# Altium footprint library DAPLink.PcbLib: 21 footprints (part 2 of 2)
Each footprint in its own frame and in the unit in brackets; x right, y up, seen from the top. Pads: shape width x height; smd on the part's side, far side on the other; paste and mask are expansions set on the pad; w line width, h text height; cw(c..) or ccw(c..) is an arc to the next point about the centre after c.
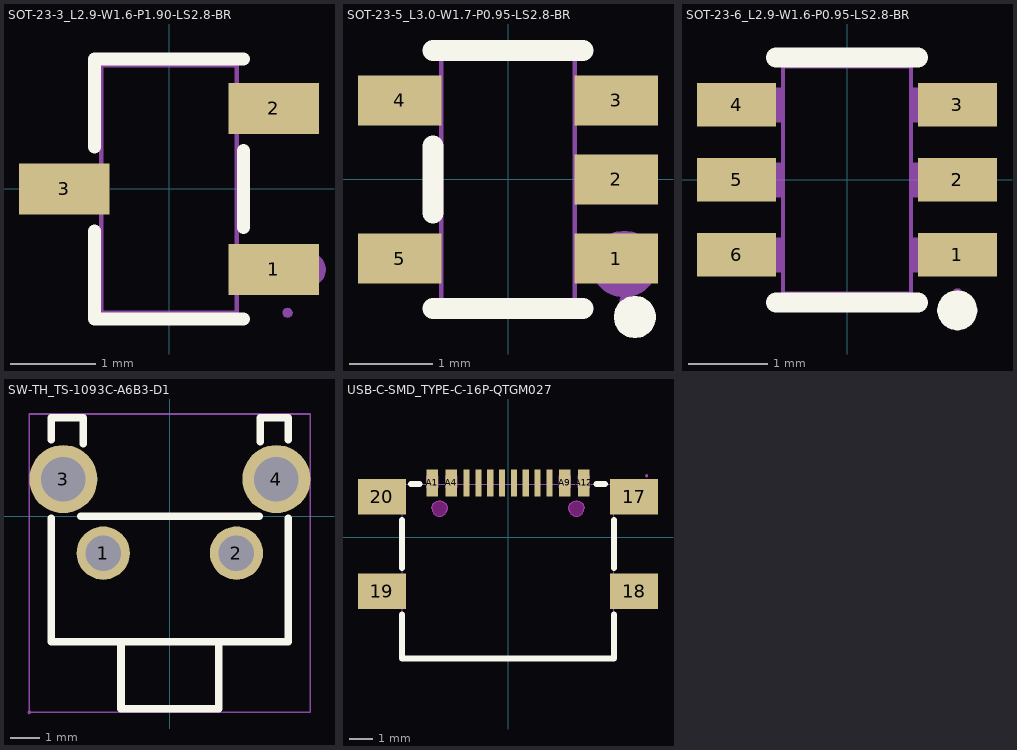
[diagram p1: the footprints below, top view; thin cyan lines are the x and y axes]

## SOT-23-3_L2.9-W1.6-P1.90-LS2.8-BR [mil]
pads (3):
  rect 42.1x23.6 smd paste+0 mask+2: 1(48.6,-37.4) 2(48.6,37.4) 3(-48.6,0)
Top Overlay:
  lines w6: -34.5,-19.5 -34.5,-60.5 34.5,-60.5 ; -34.5,19.4 -34.5,60.4 34.5,60.4 ; 34.5,-18 34.5,17.9
Mechanical 6:
  lines w7.9: 61.1,-37.4 61.5,-35.7 62.5,-34.4 64.1,-33.6 65.9,-33.6 67.5,-34.4 68.6,-35.7 68.9,-37.4 68.6,-39.2 67.5,-40.5 65.9,-41.3 64.1,-41.3 62.5,-40.5 61.5,-39.2 61.1,-37.4
Mechanical 7:
  lines w2: -31.5,-57.5 31.5,-57.5 31.5,57.4 -31.5,57.4 -31.5,-57.5
Mechanical 8:
  region: 57.5,-57.5 57.1,-58.8 56.1,-59.7 54.8,-59.9 53.6,-59.3 52.8,-58.2 52.8,-56.9 53.6,-55.7 54.8,-55.2 56.1,-55.4 57.1,-56.3
Mechanical 9:
  region: -37.4,-7.9 -37.4,7.8 -55.1,7.8 -55.1,-7.9
  region: 37.4,29.5 37.4,45.2 55.1,45.2 55.1,29.5
  region: 37.4,-45.3 37.4,-29.6 55.1,-29.6 55.1,-45.3
Mechanical 10:
  region: -37.8,-7.9 -37.8,7.8 -31.1,7.8 -31.1,-7.9
  region: 31.1,29.5 31.1,45.2 37.8,45.2 37.8,29.5
  region: 31.1,-45.3 31.1,-29.6 37.8,-29.6 37.8,-45.3

## SOT-23-5_L3.0-W1.7-P0.95-LS2.8-BR [mil]
pads (5):
  rect 39.4x23.6 smd paste+0 mask+2: 1(51.2,-37.4) 2(51.2,0) 3(51.2,37.4) 4(-51.2,37.4) 5(-51.2,-37.4)
Top Overlay:
  lines w10: -35.4,-61 35.4,-61 ; -35.4,-15.8 -35.4,15.7 ; -35.4,61 35.4,61 ; 55,-65 55.4,-63.1 56.4,-61.5 58.1,-60.4 60,-60 61.9,-60.4 63.5,-61.5 64.6,-63.1 65,-65 64.6,-66.9 63.5,-68.6 61.9,-69.7 60,-70 58.1,-69.7 56.4,-68.6 55.4,-66.9 55,-65
Mechanical 6:
  lines w15.7: 47.1,-40 47.5,-37.6 48.6,-35.4 50.3,-33.6 52.5,-32.5 55,-32.1 57.4,-32.5 59.6,-33.6 61.4,-35.4 62.5,-37.6 62.9,-40 62.5,-42.5 61.4,-44.7 59.6,-46.4 57.4,-47.5 55,-47.9 52.5,-47.5 50.3,-46.4 48.6,-44.7 47.5,-42.5 47.1,-40
Mechanical 7:
  lines w2: -31.5,-57.1 -31.5,57.1 31.5,57.1 31.5,-57.1 -31.5,-57.1
Mechanical 8:
  region: 57.5,-57.1 57.1,-58.4 56.1,-59.3 54.7,-59.5 53.5,-58.9 52.8,-57.8 52.8,-56.5 53.5,-55.3 54.7,-54.8 56.1,-54.9 57.1,-55.8
Mechanical 9:
  region: -55.1,-45.3 -55.1,-29.5 -37.4,-29.5 -37.4,-45.3
  region: -55.1,29.5 -55.1,45.3 -37.4,45.3 -37.4,29.5
  region: 37.4,29.5 37.4,45.3 55.1,45.3 55.1,29.5
  region: 37.4,-7.9 37.4,7.9 55.1,7.9 55.1,-7.9
  region: 37.4,-45.3 37.4,-29.5 55.1,-29.5 55.1,-45.3
Mechanical 10:
  region: -37.8,-45.3 -37.8,-29.5 -31.1,-29.5 -31.1,-45.3
  region: -37.8,29.5 -37.8,45.3 -31.1,45.3 -31.1,29.5
  region: 31.1,29.5 31.1,45.3 37.8,45.3 37.8,29.5
  region: 31.1,-7.9 31.1,7.9 37.8,7.9 37.8,-7.9
  region: 31.1,-45.3 31.1,-29.5 37.8,-29.5 37.8,-45.3

## SOT-23-6_L2.9-W1.6-P0.95-LS2.8-BR [mil]
pads (6):
  rect 39.4x21.7 smd paste+0 mask+2: 1(55.1,-37.4) 2(55.1,0) 3(55.1,37.4) 4(-55.1,37.4) 5(-55.1,0) 6(-55.1,-37.4)
Top Overlay:
  lines w10: -35.4,-61 35.4,-61 ; -35.4,61 35.4,61 ; 50,-65 50.4,-63 51.5,-61.4 53.1,-60.3 55,-60 57,-60.3 58.6,-61.4 59.7,-63 60,-65 59.7,-66.9 58.6,-68.5 57,-69.6 55,-70 53.1,-69.6 51.5,-68.5 50.4,-66.9 50,-65
Mechanical 6:
  lines w7.9: 51.2,-37.4 51.6,-35.7 52.7,-34.3 54.3,-33.6 56,-33.6 57.6,-34.3 58.7,-35.7 59,-37.4 58.7,-39 57.6,-40.4 56,-41.2 54.3,-41.2 52.7,-40.4 51.6,-39 51.2,-37.4
Mechanical 7:
  lines w2: -31.9,-56.5 31.9,-56.5 31.9,56.5 -31.9,56.5 -31.9,-56.5
Mechanical 8:
  region: 57.5,-56.5 57.2,-57.8 56.1,-58.6 54.8,-58.8 53.6,-58.3 52.8,-57.1 52.8,-55.8 53.6,-54.6 54.8,-54.1 56.1,-54.3 57.2,-55.2
Mechanical 9:
  region: 36.4,-45.9 36.4,-28.9 55.1,-28.9 55.1,-45.9
  region: 36.4,-8.5 36.4,8.5 55.1,8.5 55.1,-8.5
  region: 36.4,28.9 36.4,45.9 55.1,45.9 55.1,28.9
  region: -36.4,28.9 -36.4,45.9 -55.1,45.9 -55.1,28.9
  region: -36.4,-8.5 -36.4,8.5 -55.1,8.5 -55.1,-8.5
  region: -36.4,-45.9 -36.4,-28.9 -55.1,-28.9 -55.1,-45.9
Mechanical 10:
  region: 36.8,45.9 36.8,28.9 31.1,28.9 31.1,45.9
  region: 36.8,8.5 36.8,-8.5 31.1,-8.5 31.1,8.5
  region: 36.8,-28.9 36.8,-45.9 31.1,-45.9 31.1,-28.9
  region: -36.8,-45.9 -36.8,-28.9 -31.1,-28.9 -31.1,-45.9
  region: -36.8,-8.5 -36.8,8.5 -31.1,8.5 -31.1,-8.5
  region: -36.8,28.9 -36.8,45.9 -31.1,45.9 -31.1,28.9

## SW-TH_TS-1093C-A6B3-D1 [mil]
pads (4):
  round 70.9 hole 47.2 paste-99999 mask+2: 1(-88.6,-49.2) 2(88.6,-49.2)
  round 90.6 hole 59.1 paste-99999 mask+2: 3(-141.7,49.2) 4(141.7,49.2)
Top Overlay:
  lines w10: -157.5,-2.8 -157.5,-167.3 157.5,-167.3 157.5,-2.8 ; -157.5,101.3 -157.5,130.8 -115,130.8 -115,96.5 ; -118.7,0 118.7,0 ; -65,-167.3 -65,-255.9 65,-255.9 65,-167.3 ; 120,99 120,130.8 157.5,130.8 157.5,101.3
Mechanical 7:
  lines w2: -187,-260.9 -187,135.8 187,135.8 187,-260.9 -187,-260.9
Mechanical 8:
  region: -184.6,-260.9 -185,-262.2 -186,-263.1 -187.4,-263.2 -188.6,-262.7 -189.3,-261.5 -189.3,-260.2 -188.6,-259.1 -187.4,-258.5 -186,-258.7 -185,-259.6
Mechanical 9:
  region: 167.3,49.2 166.9,44.8 165.7,40.5 163.8,36.4 161.3,32.8 158.1,29.6 154.5,27.1 150.4,25.2 146.1,24 141.7,23.6 137.2,24 132.9,25.2 128.9,27.1 125.2,29.6 122,32.8 119.5,36.4 117.6,40.5 116.4,44.8 116.1,49.2 116.4,53.7 117.6,58 119.5,62 122,65.7 125.2,68.8 128.9,71.4 132.9,73.3 137.2,74.4 141.7,74.8 146.1,74.4 150.4,73.3 154.5,71.4 158.1,68.8 161.3,65.7 163.8,62 165.7,58 166.9,53.7
  region: -116.1,49.2 -116.5,44.8 -117.7,40.5 -119.6,36.4 -122.1,32.8 -125.3,29.6 -128.9,27.1 -133,25.2 -137.3,24 -141.7,23.6 -146.2,24 -150.5,25.2 -154.5,27.1 -158.2,29.6 -161.4,32.8 -163.9,36.4 -165.8,40.5 -167,44.8 -167.3,49.2 -167,53.7 -165.8,58 -163.9,62 -161.4,65.7 -158.2,68.8 -154.5,71.4 -150.5,73.3 -146.2,74.4 -141.7,74.8 -137.3,74.4 -133,73.3 -128.9,71.4 -125.3,68.8 -122.1,65.7 -119.6,62 -117.7,58 -116.5,53.7
  region: 108.3,-49.2 107.9,-53 106.8,-56.7 104.9,-60.1 102.5,-63.1 99.5,-65.5 96.1,-67.4 92.4,-68.5 88.6,-68.9 84.7,-68.5 81,-67.4 77.6,-65.5 74.6,-63.1 72.2,-60.1 70.4,-56.7 69.2,-53 68.9,-49.2 69.2,-45.3 70.4,-41.6 72.2,-38.2 74.6,-35.2 77.6,-32.8 81,-31 84.7,-29.8 88.6,-29.5 92.4,-29.8 96.1,-31 99.5,-32.8 102.5,-35.2 104.9,-38.2 106.8,-41.6 107.9,-45.3
  region: -68.9,-49.2 -69.3,-53 -70.4,-56.7 -72.3,-60.1 -74.7,-63.1 -77.7,-65.5 -81.1,-67.4 -84.8,-68.5 -88.6,-68.9 -92.5,-68.5 -96.2,-67.4 -99.6,-65.5 -102.6,-63.1 -105,-60.1 -106.8,-56.7 -108,-53 -108.3,-49.2 -108,-45.3 -106.8,-41.6 -105,-38.2 -102.6,-35.2 -99.6,-32.8 -96.2,-31 -92.5,-29.8 -88.6,-29.5 -84.8,-29.8 -81.1,-31 -77.7,-32.8 -74.7,-35.2 -72.3,-38.2 -70.4,-41.6 -69.3,-45.3

## USB-C-SMD_TYPE-C-16P-QTGM027 [mil]
pads (16):
  rect 79.5x59.1 smd paste+0 mask+2: 17(209.8,67.4) 18(209.8,-90) 19(-209.8,-90) 20(-209.8,67.4)
  rect 19.7x45.3 smd paste+0 mask+2: A1(-126,90.1) A4(-94.5,90.1) A9(94.5,90.1) A12(126,90.1)
  rect 10.2x45.3 smd paste+0 mask+2: A5(-49.2,90.1) A6(-9.8,90.1) A7(9.8,90.1) A8(49.2,90.1) B5(68.9,90.1) B6(29.5,90.1) B7(-29.5,90.1) B8(-68.9,90.1)
Top Overlay:
  lines w10: -176,-128.7 -176,-202.3 176,-202.3 176,-128.7 ; -176,-51.4 -176,28.8 ; -161,88.2 -146.9,88.2 ; 146.9,88.2 161,88.2 ; 176,-51.4 176,28.8
Keep-Out Layer:
  board cut-out: -101,47.7 -101.3,44.6 -102.4,41.8 -104.2,39.2 -106.5,37.2 -109.2,35.7 -112.2,35 -115.3,35 -118.3,35.7 -121,37.2 -123.3,39.2 -125.1,41.8 -126.2,44.6 -126.6,47.7 -126.2,50.8 -125.1,53.6 -123.3,56.2 -121,58.2 -118.3,59.7 -115.3,60.4 -112.2,60.4 -109.2,59.7 -106.5,58.2 -104.2,56.2 -102.4,53.6 -101.3,50.8
  board cut-out: 126.6,47.7 126.3,44.6 125.2,41.8 123.4,39.2 121.1,37.2 118.4,35.7 115.4,35 112.3,35 109.3,35.7 106.6,37.2 104.3,39.2 102.5,41.8 101.4,44.6 101,47.7 101.4,50.8 102.5,53.6 104.3,56.2 106.6,58.2 109.3,59.7 112.3,60.4 115.4,60.4 118.4,59.7 121.1,58.2 123.4,56.2 125.2,53.6 126.3,50.8
Keep-Out Layer:
  drawing of 56 lines, arcs and shapes, not listed
Mechanical 1:
  lines w0.1: -126.6,47.7 -126.2,44.6 -125.1,41.8 -123.3,39.2 -121,37.2 -118.3,35.7 -115.3,35 -112.2,35 -109.2,35.7 -106.5,37.2 -104.2,39.2 -102.4,41.8 -101.3,44.6 -101,47.7 -101.3,50.8 -102.4,53.6 -104.2,56.2 -106.5,58.2 -109.2,59.7 -112.2,60.4 -115.3,60.4 -118.3,59.7 -121,58.2 -123.3,56.2 -125.1,53.6 -126.2,50.8 -126.6,47.7 ; 101,47.7 101.4,44.6 102.5,41.8 104.3,39.2 106.6,37.2 109.3,35.7 112.3,35 115.4,35 118.4,35.7 121.1,37.2 123.4,39.2 125.2,41.8 126.3,44.6 126.6,47.7 126.3,50.8 125.2,53.6 123.4,56.2 121.1,58.2 118.4,59.7 115.4,60.4 112.3,60.4 109.3,59.7 106.6,58.2 104.3,56.2 102.5,53.6 101.4,50.8 101,47.7
Mechanical 7:
  lines w2: -176,-201.2 176,-201.2 176,88.2 -176,88.2 -176,-201.2
Mechanical 8:
  region: 232.7,102 232.4,100.7 231.3,99.8 230,99.6 228.8,100.2 228,101.3 228,102.7 228.8,103.8 230,104.4 231.3,104.2 232.4,103.3
Mechanical 9:
  region: -230.3,87.1 -174,87.1 -174,47.7 -230.3,47.7
  region: 230.3,47.8 174,47.8 174,87.1 230.3,87.1
  region: -230.3,-76.3 -174,-76.3 -174,-103.8 -230.3,-103.8
  region: 230.3,-103.8 174,-103.8 174,-76.3 230.3,-76.3
  region: 65,102 72.8,102 72.8,82.3 65,82.3
  region: 45.3,102 53.1,102 53.1,82.3 45.3,82.3
  region: 25.6,102 33.5,102 33.5,82.3 25.6,82.3
  region: 5.9,102 13.8,102 13.8,82.3 5.9,82.3
  region: -13.8,102 -5.9,102 -5.9,82.3 -13.8,82.3
  region: -33.5,102 -25.6,102 -25.6,82.3 -33.5,82.3
  region: -53.1,102 -45.3,102 -45.3,82.3 -53.1,82.3
  region: -72.8,102 -65,102 -65,82.3 -72.8,82.3
  region: 84.6,102 104.3,102 104.3,82.3 84.6,82.3
  region: 116.1,102 135.8,102 135.8,82.3 116.1,82.3
  region: -104.3,102 -84.6,102 -84.6,82.3 -104.3,82.3
  region: -135.8,102 -116.1,102 -116.1,82.3 -135.8,82.3